# Altium schematic symbol library MY_LIB_Inductors_IEC.SchLib: 1 symbol
Pins are listed as number, name and electrical type; pins without a type are passive.

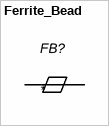
[diagram p0: symbol Ferrite_Bead]

## Ferrite_Bead
designator FB?
Ferrite bead; Value: *
pins: 1, 2